# Altium footprint library 54602-908LF.PcbLib: 1 footprints
Each footprint in its own frame and in the unit in brackets; x right, y up, seen from the top. Pads: shape width x height; smd on the part's side, far side on the other; paste and mask are expansions set on the pad; w line width, h text height; cw(c..) or ccw(c..) is an arc to the next point about the centre after c.
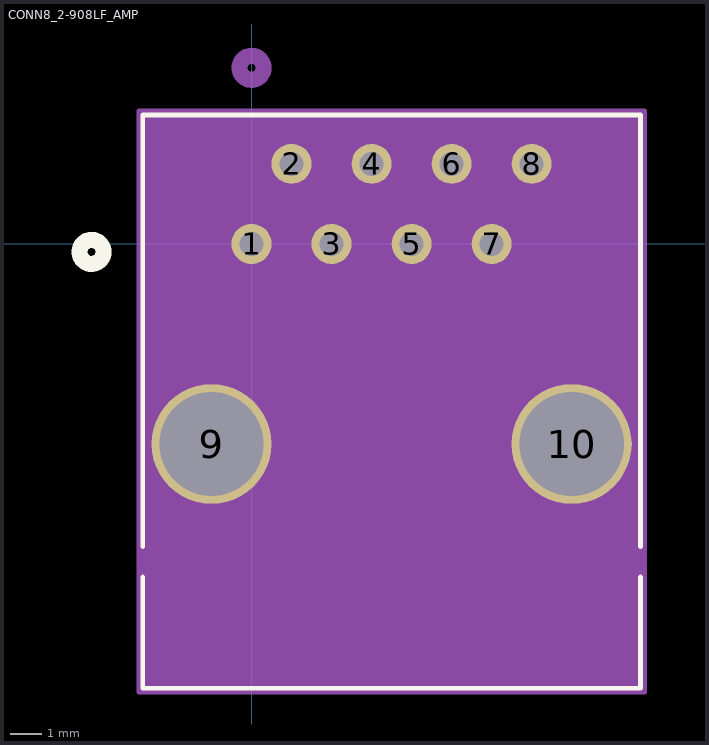
[diagram p0: the footprint, top view; thin cyan lines are the x and y axes]

## CONN8_2-908LF_AMP [mil]
pads (10):
  round 50 / inner round 60 / far side round 50 hole 30 paste-25 mask+0: 1(0,0) 2(50,100) 3(100,0) 4(150,100) 5(200,0) 6(250,100) 7(300,0) 8(350,100)
  round 150 / inner round 60 / far side round 150 hole 130 paste-75 mask-75: 9(-50,-250) 10(400,-250)
Top Overlay:
  circle w20: c-200,-10 r15
  lines w6: -136,-416.13 -136,-555.01 486,-555.01 486,-416.13 ; -136,-377.89 -136,160.99 486,160.99 486,-377.89
Bottom Overlay:
  circle w20: c-220,-10 r15
Mechanical 13:
  circle w20: c0,220 r15
  lines w1: -131,-550.01 481,-550.01 481,155.99 -131,155.99 -131,-550.01
Mechanical 15:
  region: 491,165.99 -141,165.99 -141,-560.01 491,-560.01
  lines w6: -141,-560.01 -141,165.99 491,165.99 491,-560.01 -141,-560.01